# Altium schematic symbol library 750319690.SchLib: 1 symbol
Pins are listed as number, name and electrical type; pins without a type are passive.

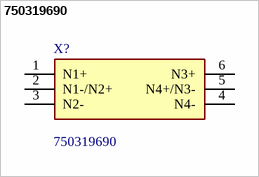
[diagram p0: symbol 750319690]

## 750319690
designator X?
WE-PPTI Push-Pull Transformer TOR6/3/3 SMT; Ui = 12V; Uo1 = 5V/0.7A; f = 400-600kHz; Manufacturer_Name: Wurth Elektronik; Geometry.Height: 5.5mm; Mouser Part Number: 710-750319690; Mouser Price/Stock: https://www.mouser.co.uk/ProductDetail/Wurth-Elektronik/750319690?qs=1Kr7Jg1SGW%2Fxuc9sXU4Xvg%3D%3D; Manufacturer_Part_Number: 750319690; Datasheet Link: https://www.we-online.com/components/products/datasheet/750319690.pdf
footprint 750319690
pins: 1 N1+, 2 N1-/N2+, 3 N2-, 4 N4-, 5 N4+/N3-, 6 N3+